# Altium footprint library Transistores.PcbLib: 6 footprints
Each footprint in its own frame and in the unit in brackets; x right, y up, seen from the top. Pads: shape width x height; smd on the part's side, far side on the other; paste and mask are expansions set on the pad; w line width, h text height; cw(c..) or ccw(c..) is an arc to the next point about the centre after c.
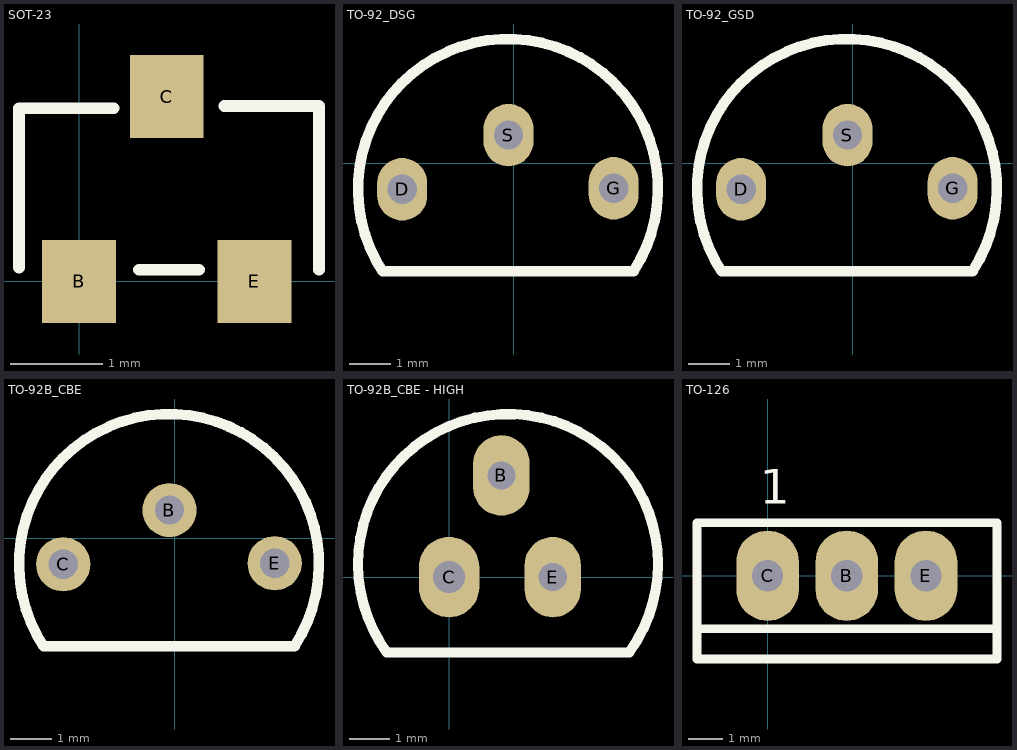
[diagram p0: the footprints below, top view; thin cyan lines are the x and y axes]

## SOT-23 [mm]
pads (3):
  rect 0.8x0.9 smd: B(0,0) C(0.95,2) E(1.9,0)
Top Overlay:
  lines w0.127: -0.65,0.15 -0.65,1.875 0.375,1.875 ; 0.65,0.125 1.3,0.125 ; 1.575,1.9 2.6,1.9 2.6,0.125
3D body "CircuitWorks-SOT-23.step": height 1.08, standoff -0.02, extent -0.525,-0.25 2.475,2.25

## TO-92_DSG [mm]
pads (3):
  oval 1.2x1.5 hole 0.7: D(-2.675,-0.625) G(2.4,-0.6) S(-0.125,0.675)
Top Overlay:
  lines w0.254: -3.145,-2.596 cw(c-0.136,-0.618) 2.876,-2.589 -3.145,-2.596
3D body "ALSRobot-TO-92B.step": height 7.34, standoff -0.7, extent -2.965,-2.025 2.715,1.775

## TO-92_GSD [mm]
pads (3):
  oval 1.2x1.5 hole 0.7: D(-2.675,-0.625) G(2.4,-0.6) S(-0.125,0.675)
Top Overlay:
  lines w0.254: -3.145,-2.596 cw(c-0.136,-0.618) 2.876,-2.589 -3.145,-2.596
3D body "ALSRobot-TO-92B.step": height 7.34, standoff -0.7, extent -2.965,-2.025 2.715,1.775

## TO-92B_CBE [mm]
pads (3):
  round 1.3 hole 0.7: B(-0.125,0.675) C(-2.675,-0.625) E(2.4,-0.6)
Top Overlay:
  lines w0.254: -3.145,-2.596 cw(c-0.136,-0.618) 2.876,-2.589 -3.145,-2.596
3D body "ALSRobot-TO-92B.step": height 7.34, standoff -0.7, extent -2.965,-2.025 2.715,1.775

## TO-92B_CBE - HIGH [mm]
pads (3):
  oval 1.4x2 hole 0.7: B(1.3,2.525) E(2.575,0)
  oval 1.5x2 hole 0.8: C(0,0)
Top Overlay:
  lines w0.254: -1.545,-1.871 cw(c1.463,0.326) 4.476,-1.864 -1.545,-1.871
3D body "User Library-TO-92-3-1.step": height 14.33, standoff -1, extent -1.325,-1.535 3.995,2.785

## TO-126 [mm]
pads (3):
  oval 1.8x2.6 hole 0.9: B(2.28,0) C(0,0) E(4.56,0)
Top Overlay:
  lines w0.254: -2.032,-1.524 -2.032,1.524 6.604,1.524 ; -2.032,-1.524 -2.032,-2.4 6.604,-2.4 6.604,1.524 ; -2.032,-1.524 6.604,-1.524 6.604,1.524
  text "1" at -0.225,2.075 h1
3D body "ALSRobot-TO-126.STEP": height 23.94, standoff -3.86, extent -1.725,-1.975 6.275,1.275